# Altium footprint library Package_BGA.PcbLib: 230 footprints (part 7 of 28)
Each footprint in its own frame and in the unit in brackets; x right, y up, seen from the top. Pads: shape width x height; smd on the part's side, far side on the other; paste and mask are expansions set on the pad; w line width, h text height; cw(c..) or ccw(c..) is an arc to the next point about the centre after c.
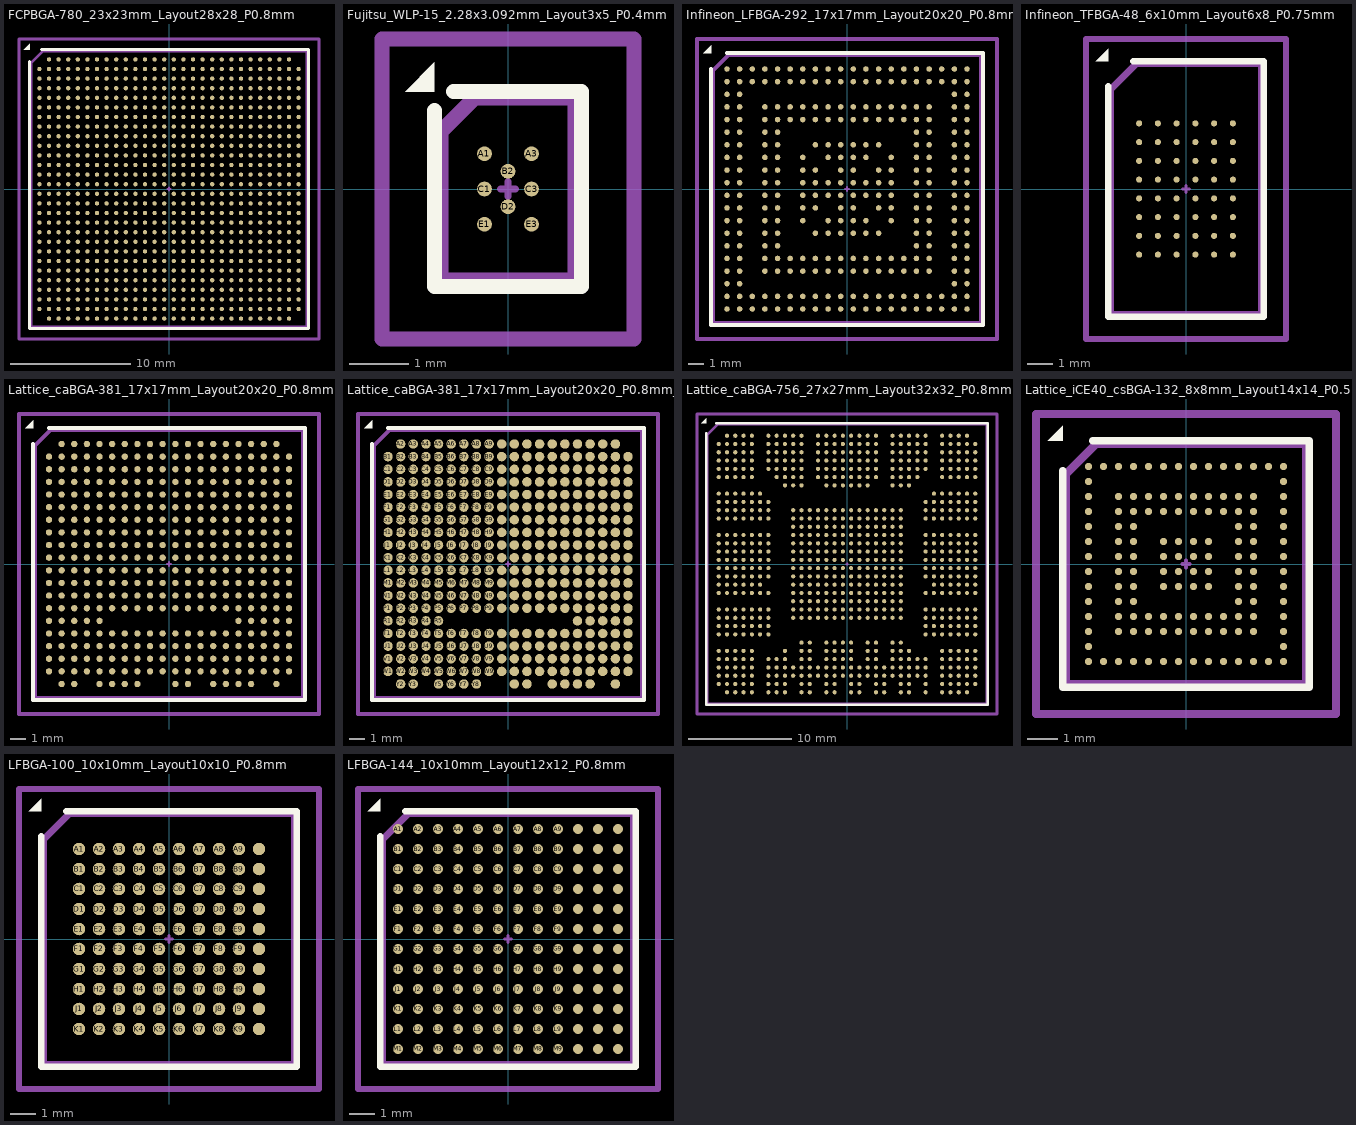
[diagram p6: the footprints below, top view; thin cyan lines are the x and y axes]

## FCPBGA-780_23x23mm_Layout28x28_P0.8mm [mm] "FCPBGA-780_23x23mm_Layout28x28_P0.8mm"
pads (780):
  round 0.36 smd: A2(-10,10.8) A3(-9.2,10.8) A4(-8.4,10.8) A5(-7.6,10.8) A6(-6.8,10.8) A7(-6,10.8) A8(-5.2,10.8) A9(-4.4,10.8) A10(-3.6,10.8) A11(-2.8,10.8) A12(-2,10.8) A13(-1.2,10.8) A14(-0.4,10.8) A15(0.4,10.8) A16(1.2,10.8) A17(2,10.8) A18(2.8,10.8) A19(3.6,10.8) A20(4.4,10.8) A21(5.2,10.8) A22(6,10.8) A23(6.8,10.8) A24(7.6,10.8) A25(8.4,10.8) A26(9.2,10.8) A27(10,10.8) AA1(-10.8,-5.2) AA2(-10,-5.2) AA3(-9.2,-5.2) AA4(-8.4,-5.2) AA5(-7.6,-5.2) AA6(-6.8,-5.2) AA7(-6,-5.2) AA8(-5.2,-5.2) AA9(-4.4,-5.2) AA10(-3.6,-5.2) AA11(-2.8,-5.2) AA12(-2,-5.2) AA13(-1.2,-5.2) AA14(-0.4,-5.2) AA15(0.4,-5.2) AA16(1.2,-5.2) AA17(2,-5.2) AA18(2.8,-5.2) AA19(3.6,-5.2) AA20(4.4,-5.2) AA21(5.2,-5.2) AA22(6,-5.2) AA23(6.8,-5.2) AA24(7.6,-5.2) AA25(8.4,-5.2) AA26(9.2,-5.2) AA27(10,-5.2) AA28(10.8,-5.2) AB1(-10.8,-6) AB2(-10,-6) AB3(-9.2,-6) AB4(-8.4,-6) AB5(-7.6,-6) AB6(-6.8,-6) AB7(-6,-6) AB8(-5.2,-6) AB9(-4.4,-6) AB10(-3.6,-6) AB11(-2.8,-6) AB12(-2,-6) AB13(-1.2,-6) AB14(-0.4,-6) AB15(0.4,-6) AB16(1.2,-6) AB17(2,-6) AB18(2.8,-6) AB19(3.6,-6) AB20(4.4,-6) AB21(5.2,-6) AB22(6,-6) AB23(6.8,-6) AB24(7.6,-6) AB25(8.4,-6) AB26(9.2,-6) AB27(10,-6) AB28(10.8,-6) AC1(-10.8,-6.8) AC2(-10,-6.8) AC3(-9.2,-6.8) AC4(-8.4,-6.8) AC5(-7.6,-6.8) AC6(-6.8,-6.8) AC7(-6,-6.8) AC8(-5.2,-6.8) AC9(-4.4,-6.8) AC10(-3.6,-6.8) AC11(-2.8,-6.8) AC12(-2,-6.8) AC13(-1.2,-6.8) AC14(-0.4,-6.8) AC15(0.4,-6.8) AC16(1.2,-6.8) AC17(2,-6.8) AC18(2.8,-6.8) AC19(3.6,-6.8) AC20(4.4,-6.8) AC21(5.2,-6.8) AC22(6,-6.8) AC23(6.8,-6.8) AC24(7.6,-6.8) AC25(8.4,-6.8) AC26(9.2,-6.8) AC27(10,-6.8) AC28(10.8,-6.8) AD1(-10.8,-7.6) AD2(-10,-7.6) AD3(-9.2,-7.6) AD4(-8.4,-7.6) AD5(-7.6,-7.6) AD6(-6.8,-7.6) AD7(-6,-7.6) AD8(-5.2,-7.6) AD9(-4.4,-7.6) AD10(-3.6,-7.6) AD11(-2.8,-7.6) AD12(-2,-7.6) AD13(-1.2,-7.6) AD14(-0.4,-7.6) AD15(0.4,-7.6) AD16(1.2,-7.6) AD17(2,-7.6) AD18(2.8,-7.6) AD19(3.6,-7.6) AD20(4.4,-7.6) AD21(5.2,-7.6) AD22(6,-7.6) AD23(6.8,-7.6) AD24(7.6,-7.6) AD25(8.4,-7.6) AD26(9.2,-7.6) AD27(10,-7.6) AD28(10.8,-7.6) AE1(-10.8,-8.4) AE2(-10,-8.4) AE3(-9.2,-8.4) AE4(-8.4,-8.4) AE5(-7.6,-8.4) AE6(-6.8,-8.4) AE7(-6,-8.4) AE8(-5.2,-8.4) AE9(-4.4,-8.4) AE10(-3.6,-8.4) AE11(-2.8,-8.4) AE12(-2,-8.4) AE13(-1.2,-8.4) AE14(-0.4,-8.4) AE15(0.4,-8.4) AE16(1.2,-8.4) AE17(2,-8.4) AE18(2.8,-8.4) AE19(3.6,-8.4) AE20(4.4,-8.4) AE21(5.2,-8.4) AE22(6,-8.4) AE23(6.8,-8.4) AE24(7.6,-8.4) AE25(8.4,-8.4) AE26(9.2,-8.4) AE27(10,-8.4) AE28(10.8,-8.4) AF1(-10.8,-9.2) AF2(-10,-9.2) AF3(-9.2,-9.2) AF4(-8.4,-9.2) AF5(-7.6,-9.2) AF6(-6.8,-9.2) AF7(-6,-9.2) AF8(-5.2,-9.2) AF9(-4.4,-9.2) AF10(-3.6,-9.2) AF11(-2.8,-9.2) AF12(-2,-9.2) AF13(-1.2,-9.2) AF14(-0.4,-9.2) AF15(0.4,-9.2) AF16(1.2,-9.2) AF17(2,-9.2) AF18(2.8,-9.2) AF19(3.6,-9.2) AF20(4.4,-9.2) AF21(5.2,-9.2) AF22(6,-9.2) AF23(6.8,-9.2) AF24(7.6,-9.2) AF25(8.4,-9.2) AF26(9.2,-9.2) AF27(10,-9.2) AF28(10.8,-9.2) AG1(-10.8,-10) AG2(-10,-10) AG3(-9.2,-10) AG4(-8.4,-10) AG5(-7.6,-10) AG6(-6.8,-10) AG7(-6,-10) AG8(-5.2,-10) AG9(-4.4,-10) AG10(-3.6,-10) AG11(-2.8,-10) AG12(-2,-10) AG13(-1.2,-10) AG14(-0.4,-10) AG15(0.4,-10) AG16(1.2,-10) AG17(2,-10) AG18(2.8,-10) AG19(3.6,-10) AG20(4.4,-10) AG21(5.2,-10) AG22(6,-10) AG23(6.8,-10) AG24(7.6,-10) AG25(8.4,-10) AG26(9.2,-10) AG27(10,-10) AG28(10.8,-10) AH2(-10,-10.8) AH3(-9.2,-10.8) AH4(-8.4,-10.8) AH5(-7.6,-10.8) AH6(-6.8,-10.8) AH7(-6,-10.8) AH8(-5.2,-10.8) AH9(-4.4,-10.8) AH10(-3.6,-10.8) AH11(-2.8,-10.8) AH12(-2,-10.8) AH13(-1.2,-10.8) AH14(-0.4,-10.8) AH15(0.4,-10.8) AH16(1.2,-10.8) AH17(2,-10.8) AH18(2.8,-10.8) AH19(3.6,-10.8) AH20(4.4,-10.8) AH21(5.2,-10.8) AH22(6,-10.8) AH23(6.8,-10.8) AH24(7.6,-10.8) AH25(8.4,-10.8) AH26(9.2,-10.8) AH27(10,-10.8) B1(-10.8,10) B2(-10,10) B3(-9.2,10) B4(-8.4,10) B5(-7.6,10) B6(-6.8,10) B7(-6,10) B8(-5.2,10) B9(-4.4,10) B10(-3.6,10) B11(-2.8,10) B12(-2,10) B13(-1.2,10) B14(-0.4,10) B15(0.4,10) B16(1.2,10) B17(2,10) B18(2.8,10) B19(3.6,10) B20(4.4,10) B21(5.2,10) B22(6,10) B23(6.8,10) B24(7.6,10) B25(8.4,10) B26(9.2,10) B27(10,10) B28(10.8,10) C1(-10.8,9.2) C2(-10,9.2) C3(-9.2,9.2) C4(-8.4,9.2) C5(-7.6,9.2) C6(-6.8,9.2) C7(-6,9.2) C8(-5.2,9.2) C9(-4.4,9.2) C10(-3.6,9.2) C11(-2.8,9.2) C12(-2,9.2) C13(-1.2,9.2) C14(-0.4,9.2) C15(0.4,9.2) C16(1.2,9.2) C17(2,9.2) C18(2.8,9.2) C19(3.6,9.2) C20(4.4,9.2) C21(5.2,9.2) C22(6,9.2) C23(6.8,9.2) C24(7.6,9.2) C25(8.4,9.2) C26(9.2,9.2) C27(10,9.2) C28(10.8,9.2) D1(-10.8,8.4) D2(-10,8.4) D3(-9.2,8.4) D4(-8.4,8.4) D5(-7.6,8.4) D6(-6.8,8.4) D7(-6,8.4) D8(-5.2,8.4) D9(-4.4,8.4) D10(-3.6,8.4) D11(-2.8,8.4) D12(-2,8.4) D13(-1.2,8.4) D14(-0.4,8.4) D15(0.4,8.4) D16(1.2,8.4) D17(2,8.4) D18(2.8,8.4) D19(3.6,8.4) D20(4.4,8.4) D21(5.2,8.4) D22(6,8.4) D23(6.8,8.4) D24(7.6,8.4) D25(8.4,8.4) D26(9.2,8.4) D27(10,8.4) D28(10.8,8.4) E1(-10.8,7.6) E2(-10,7.6) E3(-9.2,7.6) E4(-8.4,7.6) E5(-7.6,7.6) E6(-6.8,7.6) E7(-6,7.6) E8(-5.2,7.6) E9(-4.4,7.6) E10(-3.6,7.6) E11(-2.8,7.6) E12(-2,7.6) E13(-1.2,7.6) E14(-0.4,7.6) E15(0.4,7.6) E16(1.2,7.6) E17(2,7.6) E18(2.8,7.6) E19(3.6,7.6) E20(4.4,7.6) E21(5.2,7.6) E22(6,7.6) E23(6.8,7.6) E24(7.6,7.6) E25(8.4,7.6) E26(9.2,7.6) E27(10,7.6) E28(10.8,7.6) F1(-10.8,6.8) F2(-10,6.8) F3(-9.2,6.8) F4(-8.4,6.8) F5(-7.6,6.8) F6(-6.8,6.8) F7(-6,6.8) F8(-5.2,6.8) F9(-4.4,6.8) F10(-3.6,6.8) F11(-2.8,6.8) F12(-2,6.8) F13(-1.2,6.8) F14(-0.4,6.8) F15(0.4,6.8) F16(1.2,6.8) F17(2,6.8) F18(2.8,6.8) F19(3.6,6.8) F20(4.4,6.8) F21(5.2,6.8) F22(6,6.8) F23(6.8,6.8) F24(7.6,6.8) F25(8.4,6.8) F26(9.2,6.8) F27(10,6.8) F28(10.8,6.8) G1(-10.8,6) G2(-10,6) G3(-9.2,6) G4(-8.4,6) G5(-7.6,6) G6(-6.8,6) G7(-6,6) G8(-5.2,6) G9(-4.4,6) G10(-3.6,6) G11(-2.8,6) G12(-2,6) G13(-1.2,6) G14(-0.4,6) G15(0.4,6) G16(1.2,6) G17(2,6) G18(2.8,6) G19(3.6,6) G20(4.4,6) G21(5.2,6) G22(6,6) G23(6.8,6) G24(7.6,6) G25(8.4,6) G26(9.2,6) G27(10,6) G28(10.8,6) H1(-10.8,5.2) H2(-10,5.2) H3(-9.2,5.2) H4(-8.4,5.2) H5(-7.6,5.2) H6(-6.8,5.2) H7(-6,5.2) H8(-5.2,5.2) H9(-4.4,5.2) H10(-3.6,5.2) H11(-2.8,5.2) H12(-2,5.2) H13(-1.2,5.2) H14(-0.4,5.2) H15(0.4,5.2) H16(1.2,5.2) H17(2,5.2) H18(2.8,5.2) H19(3.6,5.2) H20(4.4,5.2) H21(5.2,5.2) H22(6,5.2) H23(6.8,5.2) H24(7.6,5.2) H25(8.4,5.2) H26(9.2,5.2) H27(10,5.2) H28(10.8,5.2) J1(-10.8,4.4) J2(-10,4.4) J3(-9.2,4.4) J4(-8.4,4.4) J5(-7.6,4.4) J6(-6.8,4.4) J7(-6,4.4) J8(-5.2,4.4) J9(-4.4,4.4) J10(-3.6,4.4) J11(-2.8,4.4) J12(-2,4.4) J13(-1.2,4.4) J14(-0.4,4.4) J15(0.4,4.4) J16(1.2,4.4) J17(2,4.4) J18(2.8,4.4) J19(3.6,4.4) J20(4.4,4.4) J21(5.2,4.4) J22(6,4.4) J23(6.8,4.4) J24(7.6,4.4) J25(8.4,4.4) J26(9.2,4.4) J27(10,4.4) J28(10.8,4.4) K1(-10.8,3.6) K2(-10,3.6) K3(-9.2,3.6) K4(-8.4,3.6) K5(-7.6,3.6) K6(-6.8,3.6) K7(-6,3.6) K8(-5.2,3.6) K9(-4.4,3.6) K10(-3.6,3.6) K11(-2.8,3.6) K12(-2,3.6) K13(-1.2,3.6) K14(-0.4,3.6) K15(0.4,3.6) K16(1.2,3.6) K17(2,3.6) K18(2.8,3.6) K19(3.6,3.6) K20(4.4,3.6) K21(5.2,3.6) K22(6,3.6) K23(6.8,3.6) K24(7.6,3.6) K25(8.4,3.6) K26(9.2,3.6) K27(10,3.6) K28(10.8,3.6) L1(-10.8,2.8) L2(-10,2.8) L3(-9.2,2.8) L4(-8.4,2.8) L5(-7.6,2.8) L6(-6.8,2.8) L7(-6,2.8) L8(-5.2,2.8) L9(-4.4,2.8) L10(-3.6,2.8) L11(-2.8,2.8) L12(-2,2.8) L13(-1.2,2.8) L14(-0.4,2.8) L15(0.4,2.8) L16(1.2,2.8) L17(2,2.8) L18(2.8,2.8) L19(3.6,2.8) L20(4.4,2.8) L21(5.2,2.8) L22(6,2.8) L23(6.8,2.8) L24(7.6,2.8) L25(8.4,2.8) L26(9.2,2.8) L27(10,2.8) L28(10.8,2.8) M1(-10.8,2) M2(-10,2) M3(-9.2,2) M4(-8.4,2) M5(-7.6,2) M6(-6.8,2) M7(-6,2) M8(-5.2,2) M9(-4.4,2) M10(-3.6,2) M11(-2.8,2) M12(-2,2) M13(-1.2,2) M14(-0.4,2) M15(0.4,2) M16(1.2,2) M17(2,2) M18(2.8,2) M19(3.6,2) M20(4.4,2) M21(5.2,2) M22(6,2) M23(6.8,2) M24(7.6,2) M25(8.4,2) M26(9.2,2) M27(10,2) M28(10.8,2) N1(-10.8,1.2) N2(-10,1.2) N3(-9.2,1.2) N4(-8.4,1.2) N5(-7.6,1.2) N6(-6.8,1.2) N7(-6,1.2) N8(-5.2,1.2) N9(-4.4,1.2) N10(-3.6,1.2) N11(-2.8,1.2) N12(-2,1.2) N13(-1.2,1.2) N14(-0.4,1.2) N15(0.4,1.2) N16(1.2,1.2) N17(2,1.2) N18(2.8,1.2) N19(3.6,1.2) N20(4.4,1.2) N21(5.2,1.2) N22(6,1.2) N23(6.8,1.2) N24(7.6,1.2) N25(8.4,1.2) N26(9.2,1.2) N27(10,1.2) N28(10.8,1.2) P1(-10.8,0.4) P2(-10,0.4) P3(-9.2,0.4) P4(-8.4,0.4) P5(-7.6,0.4) P6(-6.8,0.4) P7(-6,0.4) P8(-5.2,0.4) P9(-4.4,0.4) P10(-3.6,0.4) P11(-2.8,0.4) P12(-2,0.4) P13(-1.2,0.4) P14(-0.4,0.4) P15(0.4,0.4) P16(1.2,0.4) P17(2,0.4) P18(2.8,0.4) P19(3.6,0.4) P20(4.4,0.4) P21(5.2,0.4) P22(6,0.4) P23(6.8,0.4) P24(7.6,0.4) P25(8.4,0.4) P26(9.2,0.4) P27(10,0.4) P28(10.8,0.4) R1(-10.8,-0.4) R2(-10,-0.4) R3(-9.2,-0.4) R4(-8.4,-0.4) R5(-7.6,-0.4) R6(-6.8,-0.4) R7(-6,-0.4) R8(-5.2,-0.4) R9(-4.4,-0.4) R10(-3.6,-0.4) R11(-2.8,-0.4) R12(-2,-0.4) R13(-1.2,-0.4) R14(-0.4,-0.4) R15(0.4,-0.4) R16(1.2,-0.4) R17(2,-0.4) R18(2.8,-0.4) R19(3.6,-0.4) R20(4.4,-0.4) R21(5.2,-0.4) R22(6,-0.4) R23(6.8,-0.4) R24(7.6,-0.4) R25(8.4,-0.4) R26(9.2,-0.4) R27(10,-0.4) R28(10.8,-0.4) T1(-10.8,-1.2) T2(-10,-1.2) T3(-9.2,-1.2) T4(-8.4,-1.2) T5(-7.6,-1.2) T6(-6.8,-1.2) T7(-6,-1.2) T8(-5.2,-1.2) T9(-4.4,-1.2) T10(-3.6,-1.2) T11(-2.8,-1.2) T12(-2,-1.2) T13(-1.2,-1.2) T14(-0.4,-1.2) T15(0.4,-1.2) T16(1.2,-1.2) T17(2,-1.2) T18(2.8,-1.2) T19(3.6,-1.2) T20(4.4,-1.2) T21(5.2,-1.2) T22(6,-1.2) T23(6.8,-1.2) T24(7.6,-1.2) T25(8.4,-1.2) T26(9.2,-1.2) T27(10,-1.2) T28(10.8,-1.2) U1(-10.8,-2) U2(-10,-2) U3(-9.2,-2) U4(-8.4,-2) U5(-7.6,-2) U6(-6.8,-2) U7(-6,-2) U8(-5.2,-2) U9(-4.4,-2) U10(-3.6,-2) U11(-2.8,-2) U12(-2,-2) U13(-1.2,-2) U14(-0.4,-2) U15(0.4,-2) U16(1.2,-2) U17(2,-2) U18(2.8,-2) U19(3.6,-2) U20(4.4,-2) U21(5.2,-2) U22(6,-2) U23(6.8,-2) U24(7.6,-2) U25(8.4,-2) U26(9.2,-2) U27(10,-2) U28(10.8,-2) V1(-10.8,-2.8) V2(-10,-2.8) V3(-9.2,-2.8) V4(-8.4,-2.8) V5(-7.6,-2.8) V6(-6.8,-2.8) V7(-6,-2.8) V8(-5.2,-2.8) V9(-4.4,-2.8) V10(-3.6,-2.8) V11(-2.8,-2.8) V12(-2,-2.8) V13(-1.2,-2.8) V14(-0.4,-2.8) V15(0.4,-2.8) V16(1.2,-2.8) V17(2,-2.8) V18(2.8,-2.8) V19(3.6,-2.8) V20(4.4,-2.8) V21(5.2,-2.8) V22(6,-2.8) V23(6.8,-2.8) V24(7.6,-2.8) V25(8.4,-2.8) V26(9.2,-2.8) V27(10,-2.8) V28(10.8,-2.8) W1(-10.8,-3.6) W2(-10,-3.6) W3(-9.2,-3.6) W4(-8.4,-3.6) W5(-7.6,-3.6) W6(-6.8,-3.6) W7(-6,-3.6) W8(-5.2,-3.6) W9(-4.4,-3.6) W10(-3.6,-3.6) W11(-2.8,-3.6) W12(-2,-3.6) W13(-1.2,-3.6) W14(-0.4,-3.6) W15(0.4,-3.6) W16(1.2,-3.6) W17(2,-3.6) W18(2.8,-3.6) W19(3.6,-3.6) W20(4.4,-3.6) W21(5.2,-3.6) W22(6,-3.6) W23(6.8,-3.6) W24(7.6,-3.6) W25(8.4,-3.6) W26(9.2,-3.6) W27(10,-3.6) W28(10.8,-3.6) Y1(-10.8,-4.4) Y2(-10,-4.4) Y3(-9.2,-4.4) Y4(-8.4,-4.4) Y5(-7.6,-4.4) Y6(-6.8,-4.4) Y7(-6,-4.4) Y8(-5.2,-4.4) Y9(-4.4,-4.4) Y10(-3.6,-4.4) Y11(-2.8,-4.4) Y12(-2,-4.4) Y13(-1.2,-4.4) Y14(-0.4,-4.4) Y15(0.4,-4.4) Y16(1.2,-4.4) Y17(2,-4.4) Y18(2.8,-4.4) Y19(3.6,-4.4) Y20(4.4,-4.4) Y21(5.2,-4.4) Y22(6,-4.4) Y23(6.8,-4.4) Y24(7.6,-4.4) Y25(8.4,-4.4) Y26(9.2,-4.4) Y27(10,-4.4) Y28(10.8,-4.4)
F.SilkS:
  region: -11.61,11.61 -12.11,11.61 -11.61,12.11
  lines w0.254: -11.61,10.61 -11.61,-11.61 11.61,-11.61 11.61,11.61 -10.61,11.61
Top Component Center:
  lines w0.127: -0.127,0 0.127,0 -0.127,0 ; 0,-0.127 0,0.127 0,-0.127
Top Assembly:
  lines w0.254: -11.5,-11.5 -11.5,10.5 -10.5,11.5 11.5,11.5 11.5,-11.5 -11.5,-11.5
Top Courtyard:
  lines w0.254: -12.5,-12.5 -12.5,12.5 12.5,12.5 12.5,-12.5 -12.5,-12.5
Top Designator:
  text ".Designator" at -3.432,-0.345 h1.52

## Fujitsu_WLP-15_2.28x3.092mm_Layout3x5_P0.4mm [mm] "Fujitsu_WLP-15_2.28x3.092mm_Layout3x5_P0.4mm"
pads (8):
  round 0.25 smd: A1(-0.4,0.6) A3(0.4,0.6) B2(0,0.3) C1(-0.4,0) C3(0.4,0) D2(0,-0.3) E1(-0.4,-0.6) E3(0.4,-0.6)
F.SilkS:
  region: -1.25,1.656 -1.75,1.656 -1.25,2.156
  lines w0.254: -1.25,1.336 -1.25,-1.656 1.25,-1.656 1.25,1.656 -0.93,1.656
Top Component Center:
  lines w0.127: -0.127,0 0.127,0 -0.127,0 ; 0,-0.127 0,0.127 0,-0.127
Top Assembly:
  lines w0.254: -1.14,-1.546 -1.14,0.976 -0.57,1.546 1.14,1.546 1.14,-1.546 -1.14,-1.546
Top Courtyard:
  lines w0.254: -2.14,-2.55 -2.14,2.55 2.14,2.55 2.14,-2.55 -2.14,-2.55
Top Designator:
  text ".Designator" at -3.432,-0.345 h1.52
3D body "Fujitsu_WLP-15_2.28x3.092mm_Layout3x5_P0.4mm.step": height 0.25, standoff -0.01, extent -1.14,-1.545 1.14,1.545
3D body "Fujitsu_WLP-15_2.28x3.092mm_Layout3x5_P0.4mm.step": height 0.25, standoff -0.01, extent -1.14,-1.545 1.14,1.545

## Infineon_LFBGA-292_17x17mm_Layout20x20_P0.8mm [mm] "Infineon_LFBGA-292_17x17mm_Layout20x20_P0.8mm"
pads (292):
  round 0.35 smd: A1(-7.6,7.6) A2(-6.8,7.6) A3(-6,7.6) A4(-5.2,7.6) A5(-4.4,7.6) A6(-3.6,7.6) A7(-2.8,7.6) A8(-2,7.6) A9(-1.2,7.6) A10(-0.4,7.6) A11(0.4,7.6) A12(1.2,7.6) A13(2,7.6) A14(2.8,7.6) A15(3.6,7.6) A16(4.4,7.6) A17(5.2,7.6) A18(6,7.6) A19(6.8,7.6) A20(7.6,7.6) B1(-7.6,6.8) B2(-6.8,6.8) B3(-6,6.8) B4(-5.2,6.8) B5(-4.4,6.8) B6(-3.6,6.8) B7(-2.8,6.8) B8(-2,6.8) B9(-1.2,6.8) B10(-0.4,6.8) B11(0.4,6.8) B12(1.2,6.8) B13(2,6.8) B14(2.8,6.8) B15(3.6,6.8) B16(4.4,6.8) B17(5.2,6.8) B18(6,6.8) B19(6.8,6.8) B20(7.6,6.8) C1(-7.6,6) C2(-6.8,6) C19(6.8,6) C20(7.6,6) D1(-7.6,5.2) D2(-6.8,5.2) D4(-5.2,5.2) D5(-4.4,5.2) D6(-3.6,5.2) D7(-2.8,5.2) D8(-2,5.2) D9(-1.2,5.2) D10(-0.4,5.2) D11(0.4,5.2) D12(1.2,5.2) D13(2,5.2) D14(2.8,5.2) D15(3.6,5.2) D16(4.4,5.2) D17(5.2,5.2) D19(6.8,5.2) D20(7.6,5.2) E1(-7.6,4.4) E2(-6.8,4.4) E4(-5.2,4.4) E5(-4.4,4.4) E6(-3.6,4.4) E7(-2.8,4.4) E8(-2,4.4) E9(-1.2,4.4) E10(-0.4,4.4) E11(0.4,4.4) E12(1.2,4.4) E13(2,4.4) E14(2.8,4.4) E15(3.6,4.4) E16(4.4,4.4) E17(5.2,4.4) E19(6.8,4.4) E20(7.6,4.4) F1(-7.6,3.6) F2(-6.8,3.6) F4(-5.2,3.6) F5(-4.4,3.6) F16(4.4,3.6) F17(5.2,3.6) F19(6.8,3.6) F20(7.6,3.6) G1(-7.6,2.8) G2(-6.8,2.8) G4(-5.2,2.8) G5(-4.4,2.8) G8(-2,2.8) G9(-1.2,2.8) G10(-0.4,2.8) G11(0.4,2.8) G12(1.2,2.8) G13(2,2.8) G16(4.4,2.8) G17(5.2,2.8) G19(6.8,2.8) G20(7.6,2.8) H1(-7.6,2) H2(-6.8,2) H4(-5.2,2) H5(-4.4,2) H7(-2.8,2) H9(-1.2,2) H10(-0.4,2) H11(0.4,2) H12(1.2,2) H14(2.8,2) H16(4.4,2) H17(5.2,2) H19(6.8,2) H20(7.6,2) J1(-7.6,1.2) J2(-6.8,1.2) J4(-5.2,1.2) J5(-4.4,1.2) J7(-2.8,1.2) J8(-2,1.2) J10(-0.4,1.2) J11(0.4,1.2) J13(2,1.2) J14(2.8,1.2) J16(4.4,1.2) J17(5.2,1.2) J19(6.8,1.2) J20(7.6,1.2) K1(-7.6,0.4) K2(-6.8,0.4) K4(-5.2,0.4) K5(-4.4,0.4) K7(-2.8,0.4) K8(-2,0.4) K9(-1.2,0.4) K10(-0.4,0.4) K11(0.4,0.4) K12(1.2,0.4) K13(2,0.4) K14(2.8,0.4) K16(4.4,0.4) K17(5.2,0.4) K19(6.8,0.4) K20(7.6,0.4) L1(-7.6,-0.4) L2(-6.8,-0.4) L4(-5.2,-0.4) L5(-4.4,-0.4) L7(-2.8,-0.4) L8(-2,-0.4) L9(-1.2,-0.4) L10(-0.4,-0.4) L11(0.4,-0.4) L12(1.2,-0.4) L13(2,-0.4) L14(2.8,-0.4) L16(4.4,-0.4) L17(5.2,-0.4) L19(6.8,-0.4) L20(7.6,-0.4) M1(-7.6,-1.2) M2(-6.8,-1.2) M4(-5.2,-1.2) M5(-4.4,-1.2) M7(-2.8,-1.2) M8(-2,-1.2) M10(-0.4,-1.2) M11(0.4,-1.2) M13(2,-1.2) M14(2.8,-1.2) M16(4.4,-1.2) M17(5.2,-1.2) M19(6.8,-1.2) M20(7.6,-1.2) N1(-7.6,-2) N2(-6.8,-2) N4(-5.2,-2) N5(-4.4,-2) N7(-2.8,-2) N9(-1.2,-2) N10(-0.4,-2) N11(0.4,-2) N12(1.2,-2) N14(2.8,-2) N16(4.4,-2) N17(5.2,-2) N19(6.8,-2) N20(7.6,-2) P1(-7.6,-2.8) P2(-6.8,-2.8) P4(-5.2,-2.8) P5(-4.4,-2.8) P8(-2,-2.8) P9(-1.2,-2.8) P10(-0.4,-2.8) P11(0.4,-2.8) P12(1.2,-2.8) P13(2,-2.8) P16(4.4,-2.8) P17(5.2,-2.8) P19(6.8,-2.8) P20(7.6,-2.8) R1(-7.6,-3.6) R2(-6.8,-3.6) R4(-5.2,-3.6) R5(-4.4,-3.6) R16(4.4,-3.6) R17(5.2,-3.6) R19(6.8,-3.6) R20(7.6,-3.6) T1(-7.6,-4.4) T2(-6.8,-4.4) T4(-5.2,-4.4) T5(-4.4,-4.4) T6(-3.6,-4.4) T7(-2.8,-4.4) T8(-2,-4.4) T9(-1.2,-4.4) T10(-0.4,-4.4) T11(0.4,-4.4) T12(1.2,-4.4) T13(2,-4.4) T14(2.8,-4.4) T15(3.6,-4.4) T16(4.4,-4.4) T17(5.2,-4.4) T19(6.8,-4.4) T20(7.6,-4.4) U1(-7.6,-5.2) U2(-6.8,-5.2) U4(-5.2,-5.2) U5(-4.4,-5.2) U6(-3.6,-5.2) U7(-2.8,-5.2) U8(-2,-5.2) U9(-1.2,-5.2) U10(-0.4,-5.2) U11(0.4,-5.2) U12(1.2,-5.2) U13(2,-5.2) U14(2.8,-5.2) U15(3.6,-5.2) U16(4.4,-5.2) U17(5.2,-5.2) U19(6.8,-5.2) U20(7.6,-5.2) V1(-7.6,-6) V2(-6.8,-6) V19(6.8,-6) V20(7.6,-6) W1(-7.6,-6.8) W2(-6.8,-6.8) W3(-6,-6.8) W4(-5.2,-6.8) W5(-4.4,-6.8) W6(-3.6,-6.8) W7(-2.8,-6.8) W8(-2,-6.8) W9(-1.2,-6.8) W10(-0.4,-6.8) W11(0.4,-6.8) W12(1.2,-6.8) W13(2,-6.8) W14(2.8,-6.8) W15(3.6,-6.8) W16(4.4,-6.8) W17(5.2,-6.8) W18(6,-6.8) W19(6.8,-6.8) W20(7.6,-6.8) Y1(-7.6,-7.6) Y2(-6.8,-7.6) Y3(-6,-7.6) Y4(-5.2,-7.6) Y5(-4.4,-7.6) Y6(-3.6,-7.6) Y7(-2.8,-7.6) Y8(-2,-7.6) Y9(-1.2,-7.6) Y10(-0.4,-7.6) Y11(0.4,-7.6) Y12(1.2,-7.6) Y13(2,-7.6) Y14(2.8,-7.6) Y15(3.6,-7.6) Y16(4.4,-7.6) Y17(5.2,-7.6) Y18(6,-7.6) Y19(6.8,-7.6) Y20(7.6,-7.6)
F.SilkS:
  region: -8.61,8.61 -9.11,8.61 -8.61,9.11
  lines w0.254: -8.61,7.61 -8.61,-8.61 8.61,-8.61 8.61,8.61 -7.61,8.61
Top Component Center:
  lines w0.127: -0.127,0 0.127,0 -0.127,0 ; 0,-0.127 0,0.127 0,-0.127
Top Assembly:
  lines w0.254: -8.5,-8.5 8.5,-8.5 8.5,8.5 -7.5,8.5 -8.5,7.5 -8.5,-8.5
Top Courtyard:
  lines w0.254: -9.5,-9.5 9.5,-9.5 9.5,9.5 -9.5,9.5 -9.5,-9.5
Top Designator:
  text ".Designator" at -3.432,-0.345 h1.52

## Infineon_TFBGA-48_6x10mm_Layout6x8_P0.75mm [mm] "Infineon_TFBGA-48_6x10mm_Layout6x8_P0.75mm"
pads (48):
  round 0.24 smd: A1(-1.875,2.625) A2(-1.125,2.625) A3(-0.375,2.625) A4(0.375,2.625) A5(1.125,2.625) A6(1.875,2.625) B1(-1.875,1.875) B2(-1.125,1.875) B3(-0.375,1.875) B4(0.375,1.875) B5(1.125,1.875) B6(1.875,1.875) C1(-1.875,1.125) C2(-1.125,1.125) C3(-0.375,1.125) C4(0.375,1.125) C5(1.125,1.125) C6(1.875,1.125) D1(-1.875,0.375) D2(-1.125,0.375) D3(-0.375,0.375) D4(0.375,0.375) D5(1.125,0.375) D6(1.875,0.375) E1(-1.875,-0.375) E2(-1.125,-0.375) E3(-0.375,-0.375) E4(0.375,-0.375) E5(1.125,-0.375) E6(1.875,-0.375) F1(-1.875,-1.125) F2(-1.125,-1.125) F3(-0.375,-1.125) F4(0.375,-1.125) F5(1.125,-1.125) F6(1.875,-1.125) G1(-1.875,-1.875) G2(-1.125,-1.875) G3(-0.375,-1.875) G4(0.375,-1.875) G5(1.125,-1.875) G6(1.875,-1.875) H1(-1.875,-2.625) H2(-1.125,-2.625) H3(-0.375,-2.625) H4(0.375,-2.625) H5(1.125,-2.625) H6(1.875,-2.625)
F.SilkS:
  region: -3.11,5.11 -3.61,5.11 -3.11,5.61
  lines w0.254: -3.11,4.11 -3.11,-5.11 3.11,-5.11 3.11,5.11 -2.11,5.11
Top Component Center:
  lines w0.127: -0.127,0 0.127,0 -0.127,0 ; 0,-0.127 0,0.127 0,-0.127
Top Assembly:
  lines w0.254: -3,-5 -3,4 -2,5 3,5 3,-5 -3,-5
Top Courtyard:
  lines w0.254: -4,-6 -4,6 4,6 4,-6 -4,-6
Top Designator:
  text ".Designator" at -3.432,-0.345 h1.52

## Lattice_caBGA-381_17x17mm_Layout20x20_P0.8mm [mm] "Lattice_caBGA-381_17x17mm_Layout20x20_P0.8mm"
pads (381):
  round 0.4 smd: A2(-6.8,7.6) A3(-6,7.6) A4(-5.2,7.6) A5(-4.4,7.6) A6(-3.6,7.6) A7(-2.8,7.6) A8(-2,7.6) A9(-1.2,7.6) A10(-0.4,7.6) A11(0.4,7.6) A12(1.2,7.6) A13(2,7.6) A14(2.8,7.6) A15(3.6,7.6) A16(4.4,7.6) A17(5.2,7.6) A18(6,7.6) A19(6.8,7.6) B1(-7.6,6.8) B2(-6.8,6.8) B3(-6,6.8) B4(-5.2,6.8) B5(-4.4,6.8) B6(-3.6,6.8) B7(-2.8,6.8) B8(-2,6.8) B9(-1.2,6.8) B10(-0.4,6.8) B11(0.4,6.8) B12(1.2,6.8) B13(2,6.8) B14(2.8,6.8) B15(3.6,6.8) B16(4.4,6.8) B17(5.2,6.8) B18(6,6.8) B19(6.8,6.8) B20(7.6,6.8) C1(-7.6,6) C2(-6.8,6) C3(-6,6) C4(-5.2,6) C5(-4.4,6) C6(-3.6,6) C7(-2.8,6) C8(-2,6) C9(-1.2,6) C10(-0.4,6) C11(0.4,6) C12(1.2,6) C13(2,6) C14(2.8,6) C15(3.6,6) C16(4.4,6) C17(5.2,6) C18(6,6) C19(6.8,6) C20(7.6,6) D1(-7.6,5.2) D2(-6.8,5.2) D3(-6,5.2) D4(-5.2,5.2) D5(-4.4,5.2) D6(-3.6,5.2) D7(-2.8,5.2) D8(-2,5.2) D9(-1.2,5.2) D10(-0.4,5.2) D11(0.4,5.2) D12(1.2,5.2) D13(2,5.2) D14(2.8,5.2) D15(3.6,5.2) D16(4.4,5.2) D17(5.2,5.2) D18(6,5.2) D19(6.8,5.2) D20(7.6,5.2) E1(-7.6,4.4) E2(-6.8,4.4) E3(-6,4.4) E4(-5.2,4.4) E5(-4.4,4.4) E6(-3.6,4.4) E7(-2.8,4.4) E8(-2,4.4) E9(-1.2,4.4) E10(-0.4,4.4) E11(0.4,4.4) E12(1.2,4.4) E13(2,4.4) E14(2.8,4.4) E15(3.6,4.4) E16(4.4,4.4) E17(5.2,4.4) E18(6,4.4) E19(6.8,4.4) E20(7.6,4.4) F1(-7.6,3.6) F2(-6.8,3.6) F3(-6,3.6) F4(-5.2,3.6) F5(-4.4,3.6) F6(-3.6,3.6) F7(-2.8,3.6) F8(-2,3.6) F9(-1.2,3.6) F10(-0.4,3.6) F11(0.4,3.6) F12(1.2,3.6) F13(2,3.6) F14(2.8,3.6) F15(3.6,3.6) F16(4.4,3.6) F17(5.2,3.6) F18(6,3.6) F19(6.8,3.6) F20(7.6,3.6) G1(-7.6,2.8) G2(-6.8,2.8) G3(-6,2.8) G4(-5.2,2.8) G5(-4.4,2.8) G6(-3.6,2.8) G7(-2.8,2.8) G8(-2,2.8) G9(-1.2,2.8) G10(-0.4,2.8) G11(0.4,2.8) G12(1.2,2.8) G13(2,2.8) G14(2.8,2.8) G15(3.6,2.8) G16(4.4,2.8) G17(5.2,2.8) G18(6,2.8) G19(6.8,2.8) G20(7.6,2.8) H1(-7.6,2) H2(-6.8,2) H3(-6,2) H4(-5.2,2) H5(-4.4,2) H6(-3.6,2) H7(-2.8,2) H8(-2,2) H9(-1.2,2) H10(-0.4,2) H11(0.4,2) H12(1.2,2) H13(2,2) H14(2.8,2) H15(3.6,2) H16(4.4,2) H17(5.2,2) H18(6,2) H19(6.8,2) H20(7.6,2) J1(-7.6,1.2) J2(-6.8,1.2) J3(-6,1.2) J4(-5.2,1.2) J5(-4.4,1.2) J6(-3.6,1.2) J7(-2.8,1.2) J8(-2,1.2) J9(-1.2,1.2) J10(-0.4,1.2) J11(0.4,1.2) J12(1.2,1.2) J13(2,1.2) J14(2.8,1.2) J15(3.6,1.2) J16(4.4,1.2) J17(5.2,1.2) J18(6,1.2) J19(6.8,1.2) J20(7.6,1.2) K1(-7.6,0.4) K2(-6.8,0.4) K3(-6,0.4) K4(-5.2,0.4) K5(-4.4,0.4) K6(-3.6,0.4) K7(-2.8,0.4) K8(-2,0.4) K9(-1.2,0.4) K10(-0.4,0.4) K11(0.4,0.4) K12(1.2,0.4) K13(2,0.4) K14(2.8,0.4) K15(3.6,0.4) K16(4.4,0.4) K17(5.2,0.4) K18(6,0.4) K19(6.8,0.4) K20(7.6,0.4) L1(-7.6,-0.4) L2(-6.8,-0.4) L3(-6,-0.4) L4(-5.2,-0.4) L5(-4.4,-0.4) L6(-3.6,-0.4) L7(-2.8,-0.4) L8(-2,-0.4) L9(-1.2,-0.4) L10(-0.4,-0.4) L11(0.4,-0.4) L12(1.2,-0.4) L13(2,-0.4) L14(2.8,-0.4) L15(3.6,-0.4) L16(4.4,-0.4) L17(5.2,-0.4) L18(6,-0.4) L19(6.8,-0.4) L20(7.6,-0.4) M1(-7.6,-1.2) M2(-6.8,-1.2) M3(-6,-1.2) M4(-5.2,-1.2) M5(-4.4,-1.2) M6(-3.6,-1.2) M7(-2.8,-1.2) M8(-2,-1.2) M9(-1.2,-1.2) M10(-0.4,-1.2) M11(0.4,-1.2) M12(1.2,-1.2) M13(2,-1.2) M14(2.8,-1.2) M15(3.6,-1.2) M16(4.4,-1.2) M17(5.2,-1.2) M18(6,-1.2) M19(6.8,-1.2) M20(7.6,-1.2) N1(-7.6,-2) N2(-6.8,-2) N3(-6,-2) N4(-5.2,-2) N5(-4.4,-2) N6(-3.6,-2) N7(-2.8,-2) N8(-2,-2) N9(-1.2,-2) N10(-0.4,-2) N11(0.4,-2) N12(1.2,-2) N13(2,-2) N14(2.8,-2) N15(3.6,-2) N16(4.4,-2) N17(5.2,-2) N18(6,-2) N19(6.8,-2) N20(7.6,-2) P1(-7.6,-2.8) P2(-6.8,-2.8) P3(-6,-2.8) P4(-5.2,-2.8) P5(-4.4,-2.8) P6(-3.6,-2.8) P7(-2.8,-2.8) P8(-2,-2.8) P9(-1.2,-2.8) P10(-0.4,-2.8) P11(0.4,-2.8) P12(1.2,-2.8) P13(2,-2.8) P14(2.8,-2.8) P15(3.6,-2.8) P16(4.4,-2.8) P17(5.2,-2.8) P18(6,-2.8) P19(6.8,-2.8) P20(7.6,-2.8) R1(-7.6,-3.6) R2(-6.8,-3.6) R3(-6,-3.6) R4(-5.2,-3.6) R5(-4.4,-3.6) R16(4.4,-3.6) R17(5.2,-3.6) R18(6,-3.6) R19(6.8,-3.6) R20(7.6,-3.6) T1(-7.6,-4.4) T2(-6.8,-4.4) T3(-6,-4.4) T4(-5.2,-4.4) T5(-4.4,-4.4) T6(-3.6,-4.4) T7(-2.8,-4.4) T8(-2,-4.4) T9(-1.2,-4.4) T10(-0.4,-4.4) T11(0.4,-4.4) T12(1.2,-4.4) T13(2,-4.4) T14(2.8,-4.4) T15(3.6,-4.4) T16(4.4,-4.4) T17(5.2,-4.4) T18(6,-4.4) T19(6.8,-4.4) T20(7.6,-4.4) U1(-7.6,-5.2) U2(-6.8,-5.2) U3(-6,-5.2) U4(-5.2,-5.2) U5(-4.4,-5.2) U6(-3.6,-5.2) U7(-2.8,-5.2) U8(-2,-5.2) U9(-1.2,-5.2) U10(-0.4,-5.2) U11(0.4,-5.2) U12(1.2,-5.2) U13(2,-5.2) U14(2.8,-5.2) U15(3.6,-5.2) U16(4.4,-5.2) U17(5.2,-5.2) U18(6,-5.2) U19(6.8,-5.2) U20(7.6,-5.2) V1(-7.6,-6) V2(-6.8,-6) V3(-6,-6) V4(-5.2,-6) V5(-4.4,-6) V6(-3.6,-6) V7(-2.8,-6) V8(-2,-6) V9(-1.2,-6) V10(-0.4,-6) V11(0.4,-6) V12(1.2,-6) V13(2,-6) V14(2.8,-6) V15(3.6,-6) V16(4.4,-6) V17(5.2,-6) V18(6,-6) V19(6.8,-6) V20(7.6,-6) W1(-7.6,-6.8) W2(-6.8,-6.8) W3(-6,-6.8) W4(-5.2,-6.8) W5(-4.4,-6.8) W6(-3.6,-6.8) W7(-2.8,-6.8) W8(-2,-6.8) W9(-1.2,-6.8) W10(-0.4,-6.8) W11(0.4,-6.8) W12(1.2,-6.8) W13(2,-6.8) W14(2.8,-6.8) W15(3.6,-6.8) W16(4.4,-6.8) W17(5.2,-6.8) W18(6,-6.8) W19(6.8,-6.8) W20(7.6,-6.8) Y2(-6.8,-7.6) Y3(-6,-7.6) Y5(-4.4,-7.6) Y6(-3.6,-7.6) Y7(-2.8,-7.6) Y8(-2,-7.6) Y11(0.4,-7.6) Y12(1.2,-7.6) Y14(2.8,-7.6) Y15(3.6,-7.6) Y16(4.4,-7.6) Y17(5.2,-7.6) Y19(6.8,-7.6)
F.SilkS:
  region: -8.61,8.61 -9.11,8.61 -8.61,9.11
  lines w0.254: -8.61,7.61 -8.61,-8.61 8.61,-8.61 8.61,8.61 -7.61,8.61
Top Component Center:
  lines w0.127: -0.127,0 0.127,0 -0.127,0 ; 0,-0.127 0,0.127 0,-0.127
Top Assembly:
  lines w0.254: -8.5,-8.5 -8.5,7.5 -7.5,8.5 8.5,8.5 8.5,-8.5 -8.5,-8.5
Top Courtyard:
  lines w0.254: -9.5,-9.5 -9.5,9.5 9.5,9.5 9.5,-9.5 -9.5,-9.5
Top Designator:
  text ".Designator" at -3.432,-0.345 h1.52
Top 3D Body:

## Lattice_caBGA-381_17x17mm_Layout20x20_P0.8mm_SMD [mm] "Lattice_caBGA-381_17x17mm_Layout20x20_P0.8mm_SMD"
pads (381):
  round 0.6 smd: A2(-6.8,7.6) A3(-6,7.6) A4(-5.2,7.6) A5(-4.4,7.6) A6(-3.6,7.6) A7(-2.8,7.6) A8(-2,7.6) A9(-1.2,7.6) A10(-0.4,7.6) A11(0.4,7.6) A12(1.2,7.6) A13(2,7.6) A14(2.8,7.6) A15(3.6,7.6) A16(4.4,7.6) A17(5.2,7.6) A18(6,7.6) A19(6.8,7.6) B1(-7.6,6.8) B2(-6.8,6.8) B3(-6,6.8) B4(-5.2,6.8) B5(-4.4,6.8) B6(-3.6,6.8) B7(-2.8,6.8) B8(-2,6.8) B9(-1.2,6.8) B10(-0.4,6.8) B11(0.4,6.8) B12(1.2,6.8) B13(2,6.8) B14(2.8,6.8) B15(3.6,6.8) B16(4.4,6.8) B17(5.2,6.8) B18(6,6.8) B19(6.8,6.8) B20(7.6,6.8) C1(-7.6,6) C2(-6.8,6) C3(-6,6) C4(-5.2,6) C5(-4.4,6) C6(-3.6,6) C7(-2.8,6) C8(-2,6) C9(-1.2,6) C10(-0.4,6) C11(0.4,6) C12(1.2,6) C13(2,6) C14(2.8,6) C15(3.6,6) C16(4.4,6) C17(5.2,6) C18(6,6) C19(6.8,6) C20(7.6,6) D1(-7.6,5.2) D2(-6.8,5.2) D3(-6,5.2) D4(-5.2,5.2) D5(-4.4,5.2) D6(-3.6,5.2) D7(-2.8,5.2) D8(-2,5.2) D9(-1.2,5.2) D10(-0.4,5.2) D11(0.4,5.2) D12(1.2,5.2) D13(2,5.2) D14(2.8,5.2) D15(3.6,5.2) D16(4.4,5.2) D17(5.2,5.2) D18(6,5.2) D19(6.8,5.2) D20(7.6,5.2) E1(-7.6,4.4) E2(-6.8,4.4) E3(-6,4.4) E4(-5.2,4.4) E5(-4.4,4.4) E6(-3.6,4.4) E7(-2.8,4.4) E8(-2,4.4) E9(-1.2,4.4) E10(-0.4,4.4) E11(0.4,4.4) E12(1.2,4.4) E13(2,4.4) E14(2.8,4.4) E15(3.6,4.4) E16(4.4,4.4) E17(5.2,4.4) E18(6,4.4) E19(6.8,4.4) E20(7.6,4.4) F1(-7.6,3.6) F2(-6.8,3.6) F3(-6,3.6) F4(-5.2,3.6) F5(-4.4,3.6) F6(-3.6,3.6) F7(-2.8,3.6) F8(-2,3.6) F9(-1.2,3.6) F10(-0.4,3.6) F11(0.4,3.6) F12(1.2,3.6) F13(2,3.6) F14(2.8,3.6) F15(3.6,3.6) F16(4.4,3.6) F17(5.2,3.6) F18(6,3.6) F19(6.8,3.6) F20(7.6,3.6) G1(-7.6,2.8) G2(-6.8,2.8) G3(-6,2.8) G4(-5.2,2.8) G5(-4.4,2.8) G6(-3.6,2.8) G7(-2.8,2.8) G8(-2,2.8) G9(-1.2,2.8) G10(-0.4,2.8) G11(0.4,2.8) G12(1.2,2.8) G13(2,2.8) G14(2.8,2.8) G15(3.6,2.8) G16(4.4,2.8) G17(5.2,2.8) G18(6,2.8) G19(6.8,2.8) G20(7.6,2.8) H1(-7.6,2) H2(-6.8,2) H3(-6,2) H4(-5.2,2) H5(-4.4,2) H6(-3.6,2) H7(-2.8,2) H8(-2,2) H9(-1.2,2) H10(-0.4,2) H11(0.4,2) H12(1.2,2) H13(2,2) H14(2.8,2) H15(3.6,2) H16(4.4,2) H17(5.2,2) H18(6,2) H19(6.8,2) H20(7.6,2) J1(-7.6,1.2) J2(-6.8,1.2) J3(-6,1.2) J4(-5.2,1.2) J5(-4.4,1.2) J6(-3.6,1.2) J7(-2.8,1.2) J8(-2,1.2) J9(-1.2,1.2) J10(-0.4,1.2) J11(0.4,1.2) J12(1.2,1.2) J13(2,1.2) J14(2.8,1.2) J15(3.6,1.2) J16(4.4,1.2) J17(5.2,1.2) J18(6,1.2) J19(6.8,1.2) J20(7.6,1.2) K1(-7.6,0.4) K2(-6.8,0.4) K3(-6,0.4) K4(-5.2,0.4) K5(-4.4,0.4) K6(-3.6,0.4) K7(-2.8,0.4) K8(-2,0.4) K9(-1.2,0.4) K10(-0.4,0.4) K11(0.4,0.4) K12(1.2,0.4) K13(2,0.4) K14(2.8,0.4) K15(3.6,0.4) K16(4.4,0.4) K17(5.2,0.4) K18(6,0.4) K19(6.8,0.4) K20(7.6,0.4) L1(-7.6,-0.4) L2(-6.8,-0.4) L3(-6,-0.4) L4(-5.2,-0.4) L5(-4.4,-0.4) L6(-3.6,-0.4) L7(-2.8,-0.4) L8(-2,-0.4) L9(-1.2,-0.4) L10(-0.4,-0.4) L11(0.4,-0.4) L12(1.2,-0.4) L13(2,-0.4) L14(2.8,-0.4) L15(3.6,-0.4) L16(4.4,-0.4) L17(5.2,-0.4) L18(6,-0.4) L19(6.8,-0.4) L20(7.6,-0.4) M1(-7.6,-1.2) M2(-6.8,-1.2) M3(-6,-1.2) M4(-5.2,-1.2) M5(-4.4,-1.2) M6(-3.6,-1.2) M7(-2.8,-1.2) M8(-2,-1.2) M9(-1.2,-1.2) M10(-0.4,-1.2) M11(0.4,-1.2) M12(1.2,-1.2) M13(2,-1.2) M14(2.8,-1.2) M15(3.6,-1.2) M16(4.4,-1.2) M17(5.2,-1.2) M18(6,-1.2) M19(6.8,-1.2) M20(7.6,-1.2) N1(-7.6,-2) N2(-6.8,-2) N3(-6,-2) N4(-5.2,-2) N5(-4.4,-2) N6(-3.6,-2) N7(-2.8,-2) N8(-2,-2) N9(-1.2,-2) N10(-0.4,-2) N11(0.4,-2) N12(1.2,-2) N13(2,-2) N14(2.8,-2) N15(3.6,-2) N16(4.4,-2) N17(5.2,-2) N18(6,-2) N19(6.8,-2) N20(7.6,-2) P1(-7.6,-2.8) P2(-6.8,-2.8) P3(-6,-2.8) P4(-5.2,-2.8) P5(-4.4,-2.8) P6(-3.6,-2.8) P7(-2.8,-2.8) P8(-2,-2.8) P9(-1.2,-2.8) P10(-0.4,-2.8) P11(0.4,-2.8) P12(1.2,-2.8) P13(2,-2.8) P14(2.8,-2.8) P15(3.6,-2.8) P16(4.4,-2.8) P17(5.2,-2.8) P18(6,-2.8) P19(6.8,-2.8) P20(7.6,-2.8) R1(-7.6,-3.6) R2(-6.8,-3.6) R3(-6,-3.6) R4(-5.2,-3.6) R5(-4.4,-3.6) R16(4.4,-3.6) R17(5.2,-3.6) R18(6,-3.6) R19(6.8,-3.6) R20(7.6,-3.6) T1(-7.6,-4.4) T2(-6.8,-4.4) T3(-6,-4.4) T4(-5.2,-4.4) T5(-4.4,-4.4) T6(-3.6,-4.4) T7(-2.8,-4.4) T8(-2,-4.4) T9(-1.2,-4.4) T10(-0.4,-4.4) T11(0.4,-4.4) T12(1.2,-4.4) T13(2,-4.4) T14(2.8,-4.4) T15(3.6,-4.4) T16(4.4,-4.4) T17(5.2,-4.4) T18(6,-4.4) T19(6.8,-4.4) T20(7.6,-4.4) U1(-7.6,-5.2) U2(-6.8,-5.2) U3(-6,-5.2) U4(-5.2,-5.2) U5(-4.4,-5.2) U6(-3.6,-5.2) U7(-2.8,-5.2) U8(-2,-5.2) U9(-1.2,-5.2) U10(-0.4,-5.2) U11(0.4,-5.2) U12(1.2,-5.2) U13(2,-5.2) U14(2.8,-5.2) U15(3.6,-5.2) U16(4.4,-5.2) U17(5.2,-5.2) U18(6,-5.2) U19(6.8,-5.2) U20(7.6,-5.2) V1(-7.6,-6) V2(-6.8,-6) V3(-6,-6) V4(-5.2,-6) V5(-4.4,-6) V6(-3.6,-6) V7(-2.8,-6) V8(-2,-6) V9(-1.2,-6) V10(-0.4,-6) V11(0.4,-6) V12(1.2,-6) V13(2,-6) V14(2.8,-6) V15(3.6,-6) V16(4.4,-6) V17(5.2,-6) V18(6,-6) V19(6.8,-6) V20(7.6,-6) W1(-7.6,-6.8) W2(-6.8,-6.8) W3(-6,-6.8) W4(-5.2,-6.8) W5(-4.4,-6.8) W6(-3.6,-6.8) W7(-2.8,-6.8) W8(-2,-6.8) W9(-1.2,-6.8) W10(-0.4,-6.8) W11(0.4,-6.8) W12(1.2,-6.8) W13(2,-6.8) W14(2.8,-6.8) W15(3.6,-6.8) W16(4.4,-6.8) W17(5.2,-6.8) W18(6,-6.8) W19(6.8,-6.8) W20(7.6,-6.8) Y2(-6.8,-7.6) Y3(-6,-7.6) Y5(-4.4,-7.6) Y6(-3.6,-7.6) Y7(-2.8,-7.6) Y8(-2,-7.6) Y11(0.4,-7.6) Y12(1.2,-7.6) Y14(2.8,-7.6) Y15(3.6,-7.6) Y16(4.4,-7.6) Y17(5.2,-7.6) Y19(6.8,-7.6)
F.SilkS:
  region: -8.61,8.61 -9.11,8.61 -8.61,9.11
  lines w0.254: -8.61,7.61 -8.61,-8.61 8.61,-8.61 8.61,8.61 -7.61,8.61
Top Component Center:
  lines w0.127: -0.127,0 0.127,0 -0.127,0 ; 0,-0.127 0,0.127 0,-0.127
Top Assembly:
  lines w0.254: -8.5,-8.5 -8.5,7.5 -7.5,8.5 8.5,8.5 8.5,-8.5 -8.5,-8.5
Top Courtyard:
  lines w0.254: -9.5,-9.5 -9.5,9.5 9.5,9.5 9.5,-9.5 -9.5,-9.5
Top Designator:
  text ".Designator" at -3.432,-0.345 h1.52

## Lattice_caBGA-756_27x27mm_Layout32x32_P0.8mm [mm] "Lattice_caBGA-756_27x27mm_Layout32x32_P0.8mm"
pads (756):
  round 0.4 smd: A2(-11.6,12.4) A3(-10.8,12.4) A4(-10,12.4) A5(-9.2,12.4) A7(-7.6,12.4) A8(-6.8,12.4) A9(-6,12.4) A10(-5.2,12.4) A11(-4.4,12.4) A13(-2.8,12.4) A14(-2,12.4) A15(-1.2,12.4) A16(-0.4,12.4) A17(0.4,12.4) A18(1.2,12.4) A19(2,12.4) A20(2.8,12.4) A22(4.4,12.4) A23(5.2,12.4) A24(6,12.4) A25(6.8,12.4) A26(7.6,12.4) A28(9.2,12.4) A29(10,12.4) A30(10.8,12.4) A31(11.6,12.4) AA10(-5.2,-3.6) AA11(-4.4,-3.6) AA12(-3.6,-3.6) AA13(-2.8,-3.6) AA14(-2,-3.6) AA15(-1.2,-3.6) AA16(-0.4,-3.6) AA17(0.4,-3.6) AA18(1.2,-3.6) AA19(2,-3.6) AA20(2.8,-3.6) AA21(3.6,-3.6) AA22(4.4,-3.6) AA23(5.2,-3.6) AB1(-12.4,-4.4) AB2(-11.6,-4.4) AB3(-10.8,-4.4) AB4(-10,-4.4) AB5(-9.2,-4.4) AB6(-8.4,-4.4) AB7(-7.6,-4.4) AB10(-5.2,-4.4) AB11(-4.4,-4.4) AB12(-3.6,-4.4) AB13(-2.8,-4.4) AB14(-2,-4.4) AB15(-1.2,-4.4) AB16(-0.4,-4.4) AB17(0.4,-4.4) AB18(1.2,-4.4) AB19(2,-4.4) AB20(2.8,-4.4) AB21(3.6,-4.4) AB22(4.4,-4.4) AB23(5.2,-4.4) AB26(7.6,-4.4) AB27(8.4,-4.4) AB28(9.2,-4.4) AB29(10,-4.4) AB30(10.8,-4.4) AB31(11.6,-4.4) AB32(12.4,-4.4) AC1(-12.4,-5.2) AC2(-11.6,-5.2) AC3(-10.8,-5.2) AC4(-10,-5.2) AC5(-9.2,-5.2) AC6(-8.4,-5.2) AC7(-7.6,-5.2) AC10(-5.2,-5.2) AC11(-4.4,-5.2) AC12(-3.6,-5.2) AC13(-2.8,-5.2) AC14(-2,-5.2) AC15(-1.2,-5.2) AC16(-0.4,-5.2) AC17(0.4,-5.2) AC18(1.2,-5.2) AC19(2,-5.2) AC20(2.8,-5.2) AC21(3.6,-5.2) AC22(4.4,-5.2) AC23(5.2,-5.2) AC26(7.6,-5.2) AC27(8.4,-5.2) AC28(9.2,-5.2) AC29(10,-5.2) AC30(10.8,-5.2) AC31(11.6,-5.2) AC32(12.4,-5.2) AD1(-12.4,-6) AD2(-11.6,-6) AD3(-10.8,-6) AD4(-10,-6) AD5(-9.2,-6) AD6(-8.4,-6) AD7(-7.6,-6) AD26(7.6,-6) AD27(8.4,-6) AD28(9.2,-6) AD29(10,-6) AD30(10.8,-6) AD31(11.6,-6) AD32(12.4,-6) AE1(-12.4,-6.8) AE2(-11.6,-6.8) AE3(-10.8,-6.8) AE4(-10,-6.8) AE5(-9.2,-6.8) AE6(-8.4,-6.8) AE7(-7.6,-6.8) AE26(7.6,-6.8) AE27(8.4,-6.8) AE28(9.2,-6.8) AE29(10,-6.8) AE30(10.8,-6.8) AE31(11.6,-6.8) AE32(12.4,-6.8) AF11(-4.4,-7.6) AF12(-3.6,-7.6) AF14(-2,-7.6) AF15(-1.2,-7.6) AF16(-0.4,-7.6) AF17(0.4,-7.6) AF19(2,-7.6) AF20(2.8,-7.6) AF22(4.4,-7.6) AF23(5.2,-7.6) AG1(-12.4,-8.4) AG2(-11.6,-8.4) AG3(-10.8,-8.4) AG4(-10,-8.4) AG5(-9.2,-8.4) AG9(-6,-8.4) AG11(-4.4,-8.4) AG12(-3.6,-8.4) AG14(-2,-8.4) AG15(-1.2,-8.4) AG16(-0.4,-8.4) AG17(0.4,-8.4) AG19(2,-8.4) AG20(2.8,-8.4) AG22(4.4,-8.4) AG23(5.2,-8.4) AG24(6,-8.4) AG28(9.2,-8.4) AG29(10,-8.4) AG30(10.8,-8.4) AG31(11.6,-8.4) AG32(12.4,-8.4) AH1(-12.4,-9.2) AH2(-11.6,-9.2) AH3(-10.8,-9.2) AH4(-10,-9.2) AH5(-9.2,-9.2) AH7(-7.6,-9.2) AH8(-6.8,-9.2) AH9(-6,-9.2) AH11(-4.4,-9.2) AH12(-3.6,-9.2) AH14(-2,-9.2) AH15(-1.2,-9.2) AH16(-0.4,-9.2) AH17(0.4,-9.2) AH19(2,-9.2) AH20(2.8,-9.2) AH22(4.4,-9.2) AH23(5.2,-9.2) AH24(6,-9.2) AH25(6.8,-9.2) AH26(7.6,-9.2) AH28(9.2,-9.2) AH29(10,-9.2) AH30(10.8,-9.2) AH31(11.6,-9.2) AH32(12.4,-9.2) AJ1(-12.4,-10) AJ2(-11.6,-10) AJ3(-10.8,-10) AJ4(-10,-10) AJ5(-9.2,-10) AJ7(-7.6,-10) AJ8(-6.8,-10) AJ9(-6,-10) AJ10(-5.2,-10) AJ11(-4.4,-10) AJ12(-3.6,-10) AJ13(-2.8,-10) AJ14(-2,-10) AJ15(-1.2,-10) AJ16(-0.4,-10) AJ17(0.4,-10) AJ18(1.2,-10) AJ19(2,-10) AJ20(2.8,-10) AJ21(3.6,-10) AJ22(4.4,-10) AJ23(5.2,-10) AJ24(6,-10) AJ25(6.8,-10) AJ26(7.6,-10) AJ28(9.2,-10) AJ29(10,-10) AJ30(10.8,-10) AJ31(11.6,-10) AJ32(12.4,-10) AK1(-12.4,-10.8) AK2(-11.6,-10.8) AK3(-10.8,-10.8) AK4(-10,-10.8) AK5(-9.2,-10.8) AK7(-7.6,-10.8) AK8(-6.8,-10.8) AK9(-6,-10.8) AK10(-5.2,-10.8) AK11(-4.4,-10.8) AK12(-3.6,-10.8) AK13(-2.8,-10.8) AK14(-2,-10.8) AK15(-1.2,-10.8) AK16(-0.4,-10.8) AK17(0.4,-10.8) AK18(1.2,-10.8) AK19(2,-10.8) AK20(2.8,-10.8) AK21(3.6,-10.8) AK22(4.4,-10.8) AK23(5.2,-10.8) AK24(6,-10.8) AK25(6.8,-10.8) AK26(7.6,-10.8) AK28(9.2,-10.8) AK29(10,-10.8) AK30(10.8,-10.8) AK31(11.6,-10.8) AK32(12.4,-10.8) AL1(-12.4,-11.6) AL2(-11.6,-11.6) AL3(-10.8,-11.6) AL4(-10,-11.6) AL5(-9.2,-11.6) AL7(-7.6,-11.6) AL8(-6.8,-11.6) AL9(-6,-11.6) AL11(-4.4,-11.6) AL12(-3.6,-11.6) AL14(-2,-11.6) AL15(-1.2,-11.6) AL17(0.4,-11.6) AL18(1.2,-11.6) AL20(2.8,-11.6) AL21(3.6,-11.6) AL23(5.2,-11.6) AL24(6,-11.6) AL26(7.6,-11.6) AL28(9.2,-11.6) AL29(10,-11.6) AL30(10.8,-11.6) AL31(11.6,-11.6) AL32(12.4,-11.6) AM2(-11.6,-12.4) AM3(-10.8,-12.4) AM4(-10,-12.4) AM5(-9.2,-12.4) AM7(-7.6,-12.4) AM8(-6.8,-12.4) AM9(-6,-12.4) AM11(-4.4,-12.4) AM12(-3.6,-12.4) AM14(-2,-12.4) AM15(-1.2,-12.4) AM17(0.4,-12.4) AM18(1.2,-12.4) AM20(2.8,-12.4) AM21(3.6,-12.4) AM23(5.2,-12.4) AM24(6,-12.4) AM26(7.6,-12.4) AM28(9.2,-12.4) AM29(10,-12.4) AM30(10.8,-12.4) AM31(11.6,-12.4) B1(-12.4,11.6) B2(-11.6,11.6) B3(-10.8,11.6) B4(-10,11.6) B5(-9.2,11.6) B7(-7.6,11.6) B8(-6.8,11.6) B9(-6,11.6) B10(-5.2,11.6) B11(-4.4,11.6) B13(-2.8,11.6) B14(-2,11.6) B15(-1.2,11.6) B16(-0.4,11.6) B17(0.4,11.6) B18(1.2,11.6) B19(2,11.6) B20(2.8,11.6) B22(4.4,11.6) B23(5.2,11.6) B24(6,11.6) B25(6.8,11.6) B26(7.6,11.6) B28(9.2,11.6) B29(10,11.6) B30(10.8,11.6) B31(11.6,11.6) B32(12.4,11.6) C1(-12.4,10.8) C2(-11.6,10.8) C3(-10.8,10.8) C4(-10,10.8) C5(-9.2,10.8) C7(-7.6,10.8) C8(-6.8,10.8) C9(-6,10.8) C10(-5.2,10.8) C11(-4.4,10.8) C13(-2.8,10.8) C14(-2,10.8) C15(-1.2,10.8) C16(-0.4,10.8) C17(0.4,10.8) C18(1.2,10.8) C19(2,10.8) C20(2.8,10.8) C22(4.4,10.8) C23(5.2,10.8) C24(6,10.8) C25(6.8,10.8) C26(7.6,10.8) C28(9.2,10.8) C29(10,10.8) C30(10.8,10.8) C31(11.6,10.8) C32(12.4,10.8) D1(-12.4,10) D2(-11.6,10) D3(-10.8,10) D4(-10,10) D5(-9.2,10) D7(-7.6,10) D8(-6.8,10) D9(-6,10) D10(-5.2,10) D11(-4.4,10) D13(-2.8,10) D14(-2,10) D15(-1.2,10) D16(-0.4,10) D17(0.4,10) D18(1.2,10) D19(2,10) D20(2.8,10) D22(4.4,10) D23(5.2,10) D24(6,10) D25(6.8,10) D26(7.6,10) D28(9.2,10) D29(10,10) D30(10.8,10) D31(11.6,10) D32(12.4,10) E1(-12.4,9.2) E2(-11.6,9.2) E3(-10.8,9.2) E4(-10,9.2) E5(-9.2,9.2) E7(-7.6,9.2) E8(-6.8,9.2) E9(-6,9.2) E10(-5.2,9.2) E11(-4.4,9.2) E13(-2.8,9.2) E14(-2,9.2) E15(-1.2,9.2) E16(-0.4,9.2) E17(0.4,9.2) E18(1.2,9.2) E19(2,9.2) E20(2.8,9.2) E22(4.4,9.2) E23(5.2,9.2) E24(6,9.2) E25(6.8,9.2) E26(7.6,9.2) E28(9.2,9.2) E29(10,9.2) E30(10.8,9.2) E31(11.6,9.2) E32(12.4,9.2) F1(-12.4,8.4) F2(-11.6,8.4) F3(-10.8,8.4) F4(-10,8.4) F5(-9.2,8.4) F8(-6.8,8.4) F9(-6,8.4) F10(-5.2,8.4) F11(-4.4,8.4) F13(-2.8,8.4) F14(-2,8.4) F15(-1.2,8.4) F16(-0.4,8.4) F17(0.4,8.4) F18(1.2,8.4) F19(2,8.4) F20(2.8,8.4) F22(4.4,8.4) F23(5.2,8.4) F24(6,8.4) F25(6.8,8.4) F28(9.2,8.4) F29(10,8.4) F30(10.8,8.4) F31(11.6,8.4) F32(12.4,8.4) G9(-6,7.6) G10(-5.2,7.6) G11(-4.4,7.6) G14(-2,7.6) G15(-1.2,7.6) G16(-0.4,7.6) G17(0.4,7.6) G18(1.2,7.6) G19(2,7.6) G22(4.4,7.6) G23(5.2,7.6) G24(6,7.6) H1(-12.4,6.8) H2(-11.6,6.8) H3(-10.8,6.8) H4(-10,6.8) H5(-9.2,6.8) H6(-8.4,6.8) H27(8.4,6.8) H28(9.2,6.8) H29(10,6.8) H30(10.8,6.8) H31(11.6,6.8) H32(12.4,6.8) J1(-12.4,6) J2(-11.6,6) J3(-10.8,6) J4(-10,6) J5(-9.2,6) J6(-8.4,6) J7(-7.6,6) J26(7.6,6) J27(8.4,6) J28(9.2,6) J29(10,6) J30(10.8,6) J31(11.6,6) J32(12.4,6) K1(-12.4,5.2) K2(-11.6,5.2) K3(-10.8,5.2) K4(-10,5.2) K5(-9.2,5.2) K6(-8.4,5.2) K7(-7.6,5.2) K10(-5.2,5.2) K11(-4.4,5.2) K12(-3.6,5.2) K13(-2.8,5.2) K14(-2,5.2) K15(-1.2,5.2) K16(-0.4,5.2) K17(0.4,5.2) K18(1.2,5.2) K19(2,5.2) K20(2.8,5.2) K21(3.6,5.2) K22(4.4,5.2) K23(5.2,5.2) K26(7.6,5.2) K27(8.4,5.2) K28(9.2,5.2) K29(10,5.2) K30(10.8,5.2) K31(11.6,5.2) K32(12.4,5.2) L1(-12.4,4.4) L2(-11.6,4.4) L3(-10.8,4.4) L4(-10,4.4) L5(-9.2,4.4) L6(-8.4,4.4) L7(-7.6,4.4) L10(-5.2,4.4) L11(-4.4,4.4) L12(-3.6,4.4) L13(-2.8,4.4) L14(-2,4.4) L15(-1.2,4.4) L16(-0.4,4.4) L17(0.4,4.4) L18(1.2,4.4) L19(2,4.4) L20(2.8,4.4) L21(3.6,4.4) L22(4.4,4.4) L23(5.2,4.4) L26(7.6,4.4) L27(8.4,4.4) L28(9.2,4.4) L29(10,4.4) L30(10.8,4.4) L31(11.6,4.4) L32(12.4,4.4) M10(-5.2,3.6) M11(-4.4,3.6) M12(-3.6,3.6) M13(-2.8,3.6) M14(-2,3.6) M15(-1.2,3.6) M16(-0.4,3.6) M17(0.4,3.6) M18(1.2,3.6) M19(2,3.6) M20(2.8,3.6) M21(3.6,3.6) M22(4.4,3.6) M23(5.2,3.6) N1(-12.4,2.8) N2(-11.6,2.8) N3(-10.8,2.8) N4(-10,2.8) N5(-9.2,2.8) N6(-8.4,2.8) N7(-7.6,2.8) N10(-5.2,2.8) N11(-4.4,2.8) N12(-3.6,2.8) N13(-2.8,2.8) N14(-2,2.8) N15(-1.2,2.8) N16(-0.4,2.8) N17(0.4,2.8) N18(1.2,2.8) N19(2,2.8) N20(2.8,2.8) N21(3.6,2.8) N22(4.4,2.8) N23(5.2,2.8) N26(7.6,2.8) N27(8.4,2.8) N28(9.2,2.8) N29(10,2.8) N30(10.8,2.8) N31(11.6,2.8) N32(12.4,2.8) P1(-12.4,2) P2(-11.6,2) P3(-10.8,2) P4(-10,2) P5(-9.2,2) P6(-8.4,2) P7(-7.6,2) P10(-5.2,2) P11(-4.4,2) P12(-3.6,2) P13(-2.8,2) P14(-2,2) P15(-1.2,2) P16(-0.4,2) P17(0.4,2) P18(1.2,2) P19(2,2) P20(2.8,2) P21(3.6,2) P22(4.4,2) P23(5.2,2) P26(7.6,2) P27(8.4,2) P28(9.2,2) P29(10,2) P30(10.8,2) P31(11.6,2) P32(12.4,2) R1(-12.4,1.2) R2(-11.6,1.2) R3(-10.8,1.2) R4(-10,1.2) R5(-9.2,1.2) R6(-8.4,1.2) R7(-7.6,1.2) R10(-5.2,1.2) R11(-4.4,1.2) R12(-3.6,1.2) R13(-2.8,1.2) R14(-2,1.2) R15(-1.2,1.2) R16(-0.4,1.2) R17(0.4,1.2) R18(1.2,1.2) R19(2,1.2) R20(2.8,1.2) R21(3.6,1.2) R22(4.4,1.2) R23(5.2,1.2) R26(7.6,1.2) R27(8.4,1.2) R28(9.2,1.2) R29(10,1.2) R30(10.8,1.2) R31(11.6,1.2) R32(12.4,1.2) T1(-12.4,0.4) T2(-11.6,0.4) T3(-10.8,0.4) T4(-10,0.4) T5(-9.2,0.4) T6(-8.4,0.4) T7(-7.6,0.4) T10(-5.2,0.4) T11(-4.4,0.4) T12(-3.6,0.4) T13(-2.8,0.4) T14(-2,0.4) T15(-1.2,0.4) T16(-0.4,0.4) T17(0.4,0.4) T18(1.2,0.4) T19(2,0.4) T20(2.8,0.4) T21(3.6,0.4) T22(4.4,0.4) T23(5.2,0.4) T26(7.6,0.4) T27(8.4,0.4) T28(9.2,0.4) T29(10,0.4) T30(10.8,0.4) T31(11.6,0.4) T32(12.4,0.4) U1(-12.4,-0.4) U2(-11.6,-0.4) U3(-10.8,-0.4) U4(-10,-0.4) U5(-9.2,-0.4) U6(-8.4,-0.4) U7(-7.6,-0.4) U10(-5.2,-0.4) U11(-4.4,-0.4) U12(-3.6,-0.4) U13(-2.8,-0.4) U14(-2,-0.4) U15(-1.2,-0.4) U16(-0.4,-0.4) U17(0.4,-0.4) U18(1.2,-0.4) U19(2,-0.4) U20(2.8,-0.4) U21(3.6,-0.4) U22(4.4,-0.4) U23(5.2,-0.4) U26(7.6,-0.4) U27(8.4,-0.4) U28(9.2,-0.4) U29(10,-0.4) U30(10.8,-0.4) U31(11.6,-0.4) U32(12.4,-0.4) V1(-12.4,-1.2) V2(-11.6,-1.2) V3(-10.8,-1.2) V4(-10,-1.2) V5(-9.2,-1.2) V6(-8.4,-1.2) V7(-7.6,-1.2) V10(-5.2,-1.2) V11(-4.4,-1.2) V12(-3.6,-1.2) V13(-2.8,-1.2) V14(-2,-1.2) V15(-1.2,-1.2) V16(-0.4,-1.2) V17(0.4,-1.2) V18(1.2,-1.2) V19(2,-1.2) V20(2.8,-1.2) V21(3.6,-1.2) V22(4.4,-1.2) V23(5.2,-1.2) V26(7.6,-1.2) V27(8.4,-1.2) V28(9.2,-1.2) V29(10,-1.2) V30(10.8,-1.2) V31(11.6,-1.2) V32(12.4,-1.2) W1(-12.4,-2) W2(-11.6,-2) W3(-10.8,-2) W4(-10,-2) W5(-9.2,-2) W6(-8.4,-2) W10(-5.2,-2) W11(-4.4,-2) W12(-3.6,-2) W13(-2.8,-2) W14(-2,-2) W15(-1.2,-2) W16(-0.4,-2) W17(0.4,-2) W18(1.2,-2) W19(2,-2) W20(2.8,-2) W21(3.6,-2) W22(4.4,-2) W23(5.2,-2) W27(8.4,-2) W28(9.2,-2) W29(10,-2) W30(10.8,-2) W31(11.6,-2) W32(12.4,-2) Y1(-12.4,-2.8) Y2(-11.6,-2.8) Y3(-10.8,-2.8) Y4(-10,-2.8) Y5(-9.2,-2.8) Y6(-8.4,-2.8) Y7(-7.6,-2.8) Y10(-5.2,-2.8) Y11(-4.4,-2.8) Y12(-3.6,-2.8) Y13(-2.8,-2.8) Y14(-2,-2.8) Y15(-1.2,-2.8) Y16(-0.4,-2.8) Y17(0.4,-2.8) Y18(1.2,-2.8) Y19(2,-2.8) Y20(2.8,-2.8) Y21(3.6,-2.8) Y22(4.4,-2.8) Y23(5.2,-2.8) Y26(7.6,-2.8) Y27(8.4,-2.8) Y28(9.2,-2.8) Y29(10,-2.8) Y30(10.8,-2.8) Y31(11.6,-2.8) Y32(12.4,-2.8)
F.SilkS:
  region: -13.61,13.61 -14.11,13.61 -13.61,14.11
  lines w0.254: -13.61,12.61 -13.61,-13.61 13.61,-13.61 13.61,13.61 -12.61,13.61
Top Component Center:
  lines w0.127: -0.127,0 0.127,0 -0.127,0 ; 0,-0.127 0,0.127 0,-0.127
Top Assembly:
  lines w0.254: -13.5,-13.5 -13.5,12.5 -12.5,13.5 13.5,13.5 13.5,-13.5 -13.5,-13.5
Top Courtyard:
  lines w0.254: -14.5,-14.5 -14.5,14.5 14.5,14.5 14.5,-14.5 -14.5,-14.5
Top Designator:
  text ".Designator" at -3.432,-0.345 h1.52

## Lattice_iCE40_csBGA-132_8x8mm_Layout14x14_P0.5mm [mm] "Lattice_iCE40_csBGA-132_8x8mm_Layout14x14_P0.5mm"
pads (132):
  round 0.24 smd: A1(-3.25,3.25) A2(-2.75,3.25) A3(-2.25,3.25) A4(-1.75,3.25) A5(-1.25,3.25) A6(-0.75,3.25) A7(-0.25,3.25) A8(0.25,3.25) A9(0.75,3.25) A10(1.25,3.25) A11(1.75,3.25) A12(2.25,3.25) A13(2.75,3.25) A14(3.25,3.25) B1(-3.25,2.75) B14(3.25,2.75) C1(-3.25,2.25) C3(-2.25,2.25) C4(-1.75,2.25) C5(-1.25,2.25) C6(-0.75,2.25) C7(-0.25,2.25) C8(0.25,2.25) C9(0.75,2.25) C10(1.25,2.25) C11(1.75,2.25) C12(2.25,2.25) C14(3.25,2.25) D1(-3.25,1.75) D3(-2.25,1.75) D4(-1.75,1.75) D5(-1.25,1.75) D6(-0.75,1.75) D7(-0.25,1.75) D8(0.25,1.75) D9(0.75,1.75) D10(1.25,1.75) D11(1.75,1.75) D12(2.25,1.75) D14(3.25,1.75) E1(-3.25,1.25) E3(-2.25,1.25) E4(-1.75,1.25) E11(1.75,1.25) E12(2.25,1.25) E14(3.25,1.25) F1(-3.25,0.75) F3(-2.25,0.75) F4(-1.75,0.75) F6(-0.75,0.75) F7(-0.25,0.75) F8(0.25,0.75) F9(0.75,0.75) F11(1.75,0.75) F12(2.25,0.75) F14(3.25,0.75) G1(-3.25,0.25) G3(-2.25,0.25) G4(-1.75,0.25) G6(-0.75,0.25) G7(-0.25,0.25) G8(0.25,0.25) G9(0.75,0.25) G11(1.75,0.25) G12(2.25,0.25) G14(3.25,0.25) H1(-3.25,-0.25) H3(-2.25,-0.25) H4(-1.75,-0.25) H6(-0.75,-0.25) H7(-0.25,-0.25) H8(0.25,-0.25) H9(0.75,-0.25) H11(1.75,-0.25) H12(2.25,-0.25) H14(3.25,-0.25) J1(-3.25,-0.75) J3(-2.25,-0.75) J4(-1.75,-0.75) J6(-0.75,-0.75) J7(-0.25,-0.75) J8(0.25,-0.75) J9(0.75,-0.75) J11(1.75,-0.75) J12(2.25,-0.75) J14(3.25,-0.75) K1(-3.25,-1.25) K3(-2.25,-1.25) K4(-1.75,-1.25) K11(1.75,-1.25) K12(2.25,-1.25) K14(3.25,-1.25) L1(-3.25,-1.75) L3(-2.25,-1.75) L4(-1.75,-1.75) L5(-1.25,-1.75) L6(-0.75,-1.75) L7(-0.25,-1.75) L8(0.25,-1.75) L9(0.75,-1.75) L10(1.25,-1.75) L11(1.75,-1.75) L12(2.25,-1.75) L14(3.25,-1.75) M1(-3.25,-2.25) M3(-2.25,-2.25) M4(-1.75,-2.25) M5(-1.25,-2.25) M6(-0.75,-2.25) M7(-0.25,-2.25) M8(0.25,-2.25) M9(0.75,-2.25) M10(1.25,-2.25) M11(1.75,-2.25) M12(2.25,-2.25) M14(3.25,-2.25) N1(-3.25,-2.75) N14(3.25,-2.75) P1(-3.25,-3.25) P2(-2.75,-3.25) P3(-2.25,-3.25) P4(-1.75,-3.25) P5(-1.25,-3.25) P6(-0.75,-3.25) P7(-0.25,-3.25) P8(0.25,-3.25) P9(0.75,-3.25) P10(1.25,-3.25) P11(1.75,-3.25) P12(2.25,-3.25) P13(2.75,-3.25) P14(3.25,-3.25)
F.SilkS:
  region: -4.11,4.11 -4.61,4.11 -4.11,4.61
  lines w0.254: -4.11,3.11 -4.11,-4.11 4.11,-4.11 4.11,4.11 -3.11,4.11
Top Component Center:
  lines w0.127: -0.127,0 0.127,0 -0.127,0 ; 0,-0.127 0,0.127 0,-0.127
Top Assembly:
  lines w0.254: -4,-4 4,-4 4,4 -3,4 -4,3 -4,-4
Top Courtyard:
  lines w0.254: -5,-5 5,-5 5,5 -5,5 -5,-5
Top Designator:
  text ".Designator" at -3.432,-0.345 h1.52

## LFBGA-100_10x10mm_Layout10x10_P0.8mm [mm] "LFBGA-100_10x10mm_Layout10x10_P0.8mm"
pads (100):
  round 0.5 smd: A1(-3.6,3.6) A2(-2.8,3.6) A3(-2,3.6) A4(-1.2,3.6) A5(-0.4,3.6) A6(0.4,3.6) A7(1.2,3.6) A8(2,3.6) A9(2.8,3.6) A10(3.6,3.6) B1(-3.6,2.8) B2(-2.8,2.8) B3(-2,2.8) B4(-1.2,2.8) B5(-0.4,2.8) B6(0.4,2.8) B7(1.2,2.8) B8(2,2.8) B9(2.8,2.8) B10(3.6,2.8) C1(-3.6,2) C2(-2.8,2) C3(-2,2) C4(-1.2,2) C5(-0.4,2) C6(0.4,2) C7(1.2,2) C8(2,2) C9(2.8,2) C10(3.6,2) D1(-3.6,1.2) D2(-2.8,1.2) D3(-2,1.2) D4(-1.2,1.2) D5(-0.4,1.2) D6(0.4,1.2) D7(1.2,1.2) D8(2,1.2) D9(2.8,1.2) D10(3.6,1.2) E1(-3.6,0.4) E2(-2.8,0.4) E3(-2,0.4) E4(-1.2,0.4) E5(-0.4,0.4) E6(0.4,0.4) E7(1.2,0.4) E8(2,0.4) E9(2.8,0.4) E10(3.6,0.4) F1(-3.6,-0.4) F2(-2.8,-0.4) F3(-2,-0.4) F4(-1.2,-0.4) F5(-0.4,-0.4) F6(0.4,-0.4) F7(1.2,-0.4) F8(2,-0.4) F9(2.8,-0.4) F10(3.6,-0.4) G1(-3.6,-1.2) G2(-2.8,-1.2) G3(-2,-1.2) G4(-1.2,-1.2) G5(-0.4,-1.2) G6(0.4,-1.2) G7(1.2,-1.2) G8(2,-1.2) G9(2.8,-1.2) G10(3.6,-1.2) H1(-3.6,-2) H2(-2.8,-2) H3(-2,-2) H4(-1.2,-2) H5(-0.4,-2) H6(0.4,-2) H7(1.2,-2) H8(2,-2) H9(2.8,-2) H10(3.6,-2) J1(-3.6,-2.8) J2(-2.8,-2.8) J3(-2,-2.8) J4(-1.2,-2.8) J5(-0.4,-2.8) J6(0.4,-2.8) J7(1.2,-2.8) J8(2,-2.8) J9(2.8,-2.8) J10(3.6,-2.8) K1(-3.6,-3.6) K2(-2.8,-3.6) K3(-2,-3.6) K4(-1.2,-3.6) K5(-0.4,-3.6) K6(0.4,-3.6) K7(1.2,-3.6) K8(2,-3.6) K9(2.8,-3.6) K10(3.6,-3.6)
F.SilkS:
  region: -5.11,5.11 -5.61,5.11 -5.11,5.61
  lines w0.254: -5.11,4.11 -5.11,-5.11 5.11,-5.11 5.11,5.11 -4.11,5.11
Top Component Center:
  lines w0.127: -0.127,0 0.127,0 -0.127,0 ; 0,-0.127 0,0.127 0,-0.127
Top Assembly:
  lines w0.254: -5,-5 -5,4 -4,5 5,5 5,-5 -5,-5
Top Courtyard:
  lines w0.254: -6,-6 -6,6 6,6 6,-6 -6,-6
Top Designator:
  text ".Designator" at -3.432,-0.345 h1.52
3D body "LFBGA-100_10x10mm_Layout10x10_P0.8mm.step": height 1.7, standoff -0.01, extent -5,-5 5,5
3D body "LFBGA-100_10x10mm_Layout10x10_P0.8mm.step": height 1.7, standoff -0.01, extent -5,-5 5,5

## LFBGA-144_10x10mm_Layout12x12_P0.8mm [mm] "LFBGA-144_10x10mm_Layout12x12_P0.8mm"
pads (144):
  round 0.4 smd: A1(-4.4,4.4) A2(-3.6,4.4) A3(-2.8,4.4) A4(-2,4.4) A5(-1.2,4.4) A6(-0.4,4.4) A7(0.4,4.4) A8(1.2,4.4) A9(2,4.4) A10(2.8,4.4) A11(3.6,4.4) A12(4.4,4.4) B1(-4.4,3.6) B2(-3.6,3.6) B3(-2.8,3.6) B4(-2,3.6) B5(-1.2,3.6) B6(-0.4,3.6) B7(0.4,3.6) B8(1.2,3.6) B9(2,3.6) B10(2.8,3.6) B11(3.6,3.6) B12(4.4,3.6) C1(-4.4,2.8) C2(-3.6,2.8) C3(-2.8,2.8) C4(-2,2.8) C5(-1.2,2.8) C6(-0.4,2.8) C7(0.4,2.8) C8(1.2,2.8) C9(2,2.8) C10(2.8,2.8) C11(3.6,2.8) C12(4.4,2.8) D1(-4.4,2) D2(-3.6,2) D3(-2.8,2) D4(-2,2) D5(-1.2,2) D6(-0.4,2) D7(0.4,2) D8(1.2,2) D9(2,2) D10(2.8,2) D11(3.6,2) D12(4.4,2) E1(-4.4,1.2) E2(-3.6,1.2) E3(-2.8,1.2) E4(-2,1.2) E5(-1.2,1.2) E6(-0.4,1.2) E7(0.4,1.2) E8(1.2,1.2) E9(2,1.2) E10(2.8,1.2) E11(3.6,1.2) E12(4.4,1.2) F1(-4.4,0.4) F2(-3.6,0.4) F3(-2.8,0.4) F4(-2,0.4) F5(-1.2,0.4) F6(-0.4,0.4) F7(0.4,0.4) F8(1.2,0.4) F9(2,0.4) F10(2.8,0.4) F11(3.6,0.4) F12(4.4,0.4) G1(-4.4,-0.4) G2(-3.6,-0.4) G3(-2.8,-0.4) G4(-2,-0.4) G5(-1.2,-0.4) G6(-0.4,-0.4) G7(0.4,-0.4) G8(1.2,-0.4) G9(2,-0.4) G10(2.8,-0.4) G11(3.6,-0.4) G12(4.4,-0.4) H1(-4.4,-1.2) H2(-3.6,-1.2) H3(-2.8,-1.2) H4(-2,-1.2) H5(-1.2,-1.2) H6(-0.4,-1.2) H7(0.4,-1.2) H8(1.2,-1.2) H9(2,-1.2) H10(2.8,-1.2) H11(3.6,-1.2) H12(4.4,-1.2) J1(-4.4,-2) J2(-3.6,-2) J3(-2.8,-2) J4(-2,-2) J5(-1.2,-2) J6(-0.4,-2) J7(0.4,-2) J8(1.2,-2) J9(2,-2) J10(2.8,-2) J11(3.6,-2) J12(4.4,-2) K1(-4.4,-2.8) K2(-3.6,-2.8) K3(-2.8,-2.8) K4(-2,-2.8) K5(-1.2,-2.8) K6(-0.4,-2.8) K7(0.4,-2.8) K8(1.2,-2.8) K9(2,-2.8) K10(2.8,-2.8) K11(3.6,-2.8) K12(4.4,-2.8) L1(-4.4,-3.6) L2(-3.6,-3.6) L3(-2.8,-3.6) L4(-2,-3.6) L5(-1.2,-3.6) L6(-0.4,-3.6) L7(0.4,-3.6) L8(1.2,-3.6) L9(2,-3.6) L10(2.8,-3.6) L11(3.6,-3.6) L12(4.4,-3.6) M1(-4.4,-4.4) M2(-3.6,-4.4) M3(-2.8,-4.4) M4(-2,-4.4) M5(-1.2,-4.4) M6(-0.4,-4.4) M7(0.4,-4.4) M8(1.2,-4.4) M9(2,-4.4) M10(2.8,-4.4) M11(3.6,-4.4) M12(4.4,-4.4)
F.SilkS:
  region: -5.11,5.11 -5.61,5.11 -5.11,5.61
  lines w0.254: -5.11,4.11 -5.11,-5.11 5.11,-5.11 5.11,5.11 -4.11,5.11
Top Component Center:
  lines w0.127: -0.127,0 0.127,0 -0.127,0 ; 0,-0.127 0,0.127 0,-0.127
Top Assembly:
  lines w0.254: -5,-5 5,-5 5,5 -4,5 -5,4 -5,-5
Top Courtyard:
  lines w0.254: -6,-6 6,-6 6,6 -6,6 -6,-6
Top Designator:
  text ".Designator" at -3.432,-0.345 h1.52
3D body "LFBGA-144_10x10mm_Layout12x12_P0.8mm.step": height 1.7, standoff -0.01, extent -5,-5 5,5
3D body "LFBGA-144_10x10mm_Layout12x12_P0.8mm.step": height 1.7, standoff -0.01, extent -5,-5 5,5